# Altium integrated library 284512-4.IntLib: 1 symbol
Pins are listed as number, name and electrical type; pins without a type are passive.

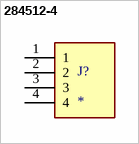
[diagram p0: symbol 284512-4]

## 284512-4
designator J?
4 POS TERMI-BLOK HDR 900 POLAR; MP: 284512-4; MF: TE Connectivity; Package: None; Purchase-URL: https://pricing.snapeda.com/search/part/284512-4/?ref=eda; Check_prices: https://www.snapeda.com/parts/284512-4/TE+Connectivity+AMP+Connectors/view-part/?ref=eda; Value: *; Digi-Key_Part_Number: A98398-ND; EU_RoHS_Compliance: Compliant; SnapEDA_Link: https://www.snapeda.com/parts/284512-4/TE+Connectivity+AMP+Connectors/view-part/?ref=snap
footprint TE_284512-4
pins: 1, 2, 3, 4